# Altium footprint library Chris_R.PcbLib: 69 footprints (part 2 of 5)
Each footprint in its own frame and in the unit in brackets; x right, y up, seen from the top. Pads: shape width x height; smd on the part's side, far side on the other; paste and mask are expansions set on the pad; w line width, h text height; cw(c..) or ccw(c..) is an arc to the next point about the centre after c.
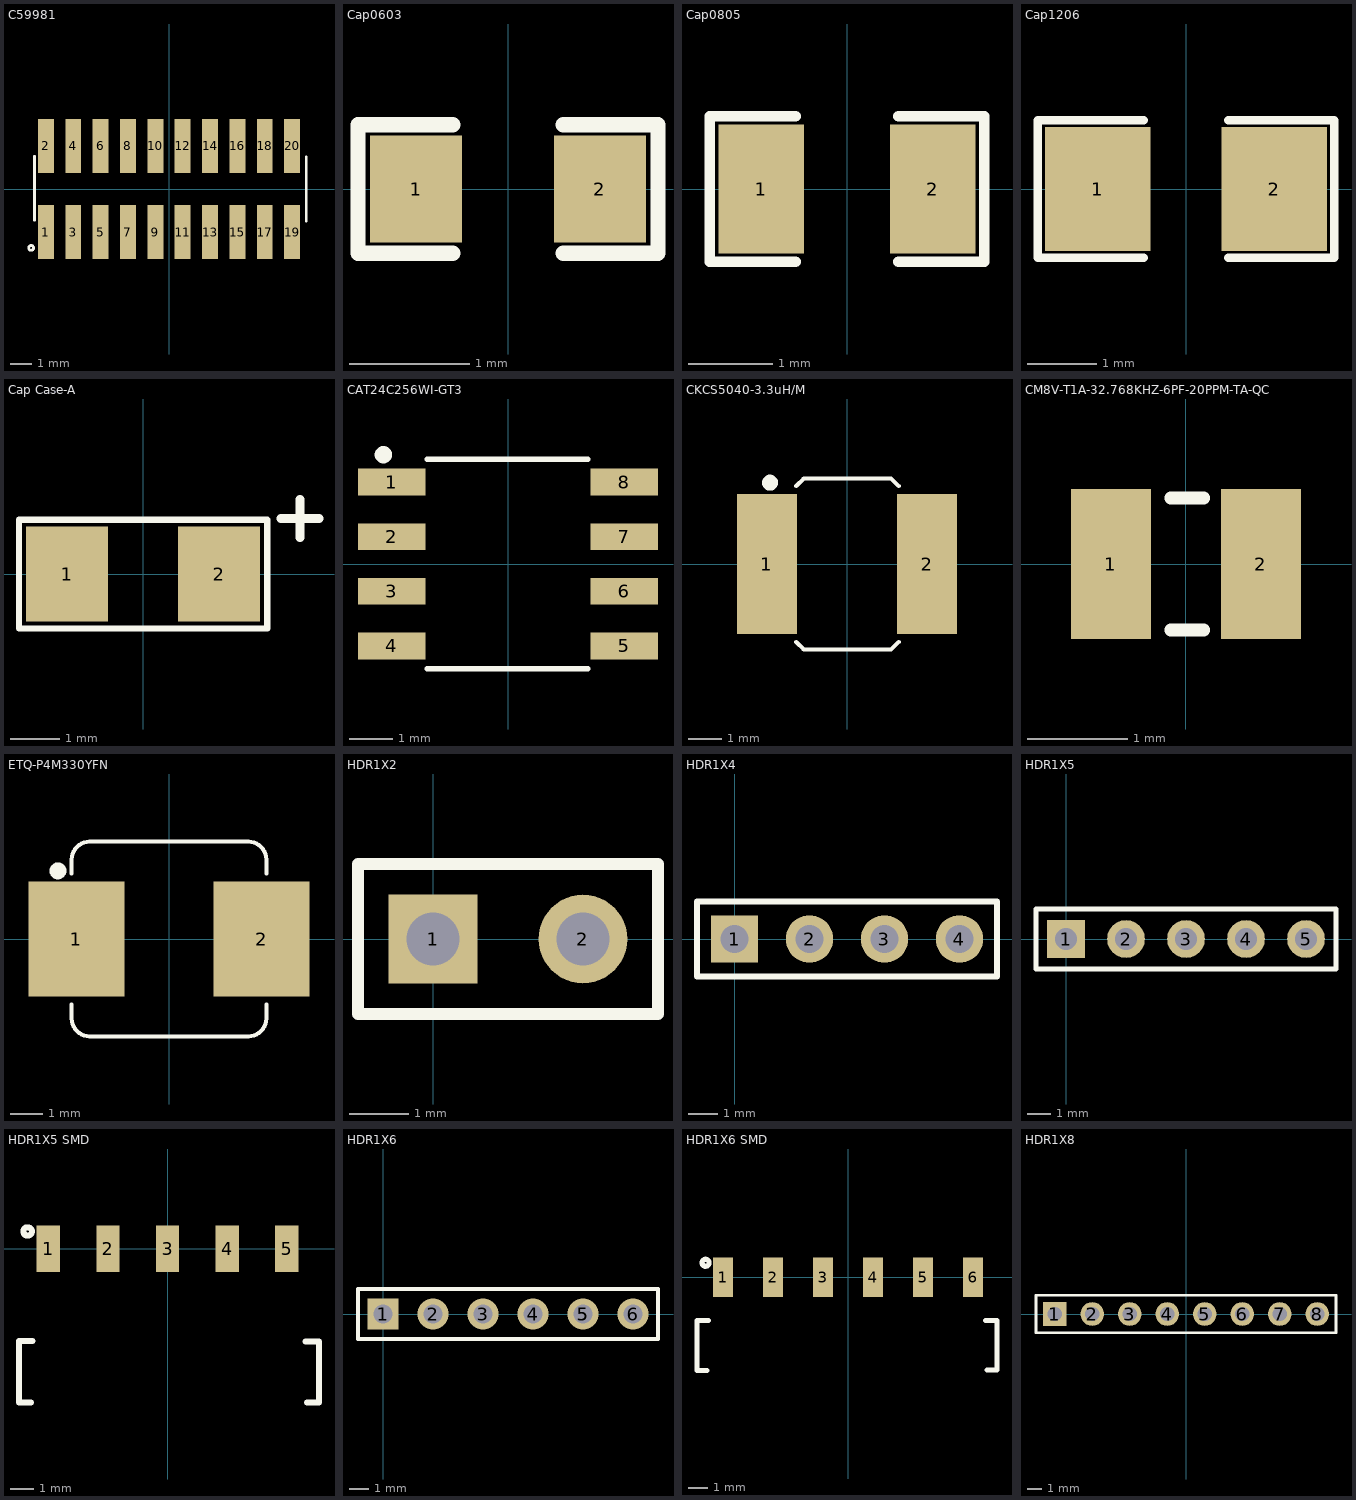
[diagram p1: the footprints below, top view; thin cyan lines are the x and y axes]

## C59981 [mm]
pads (20):
  rect 0.74x2.5 smd: 1(-5.715,-2) 2(-5.715,2) 3(-4.445,-2) 4(-4.445,2) 5(-3.175,-2) 6(-3.175,2) 7(-1.905,-2) 8(-1.905,2) 9(-0.635,-2) 10(-0.635,2) 11(0.635,-2) 12(0.635,2) 13(1.905,-2) 14(1.905,2) 15(3.175,-2) 16(3.175,2) 17(4.445,-2) 18(4.445,2) 19(5.715,-2) 20(5.715,2)
Top Overlay:
  circle w0.127: c-6.401,-2.737 r0.114
  lines w0.127: -6.248,-1.452 -6.248,1.516 ; 6.375,-1.484 6.375,1.484
3D body "M50-3601042.STEP": height 4.65, standoff -0.03, extent -6.388,-2.756 6.312,2.744

## Cap0603 [mil]
pads (2):
  rect 30x35 smd mask+2.36: 1(-30,0) 2(30,0)
Top Overlay:
  lines w5: -18,-21 -49,-21 -49,21 -18,21 ; 18,-21 49,-21 49,21 18,21
3D body "User Library-CAPC1608X09.step": height 34.25, standoff -1.18, extent -31.51,-15.75 31.49,15.74

## Cap0805 [mil] "SMD 0805"
pads (2):
  rect 40x60 smd mask+2.76: 1(-40,0) 2(40,0)
Top Overlay:
  lines w5: -24,-34 -64,-34 -64,34 -24,34 ; 24,-34 64,-34 64,34 24,34
3D body "User Library-0805 SMD Capacitor.step": height 30, standoff -0.79, extent -39.36,-24.6 39.38,24.61

## Cap1206 [mil] "SMD 1206"
pads (2):
  rect 60x70 smd: 1(-50,0) 2(50,0)
Top Overlay:
  lines w5: -24,-39 -84,-39 -84,39 -24,39 ; 24,-39 84,-39 84,39 24,39
3D body "User Library-1206 SMD Capacitor.step": height 39.45, standoff 0, extent -62.96,-31.46 63.03,31.53

## Cap Case-A [mil] "Case-A"
pads (2):
  rect 65x75 smd: 1(-60,0) 2(60,0)
Top Overlay:
  lines w5: -98,-43 -98,43 98,43 98,-43 -98,-43
  lines w7: 109,44 139,44 ; 124,29 124,59
3D body "User Library-CAP_TANT_3216-18_A_case.step": height 70.87, standoff 0, extent -66.93,-35.44 66.92,35.42

## CAT24C256WI-GT3 [mm]
pads (8):
  rect 1.57x0.62 smd: 1(-2.7,1.905) 2(-2.7,0.635) 3(-2.7,-0.635) 4(-2.7,-1.905) 5(2.7,-1.905) 6(2.7,-0.635) 7(2.7,0.635) 8(2.7,1.905)
Top Overlay:
  circle w0.2: c-2.896,2.54 r0.102
  lines w0.127: -1.88,-2.438 1.854,-2.438 ; -1.88,2.438 1.854,2.438
3D body "User Library-SOIC-8-1.step": height 1.75, standoff 0, extent -3,-2.45 3,2.45

## CKCS5040-3.3uH/M [mm] "SMD Power Inductors ROHS"
pads (2):
  rect 1.8x4.2 smd: 1(-2.4,0) 2(2.4,0)
Top Overlay:
  circle w0.254: c-2.311,2.438 r0.114
  lines w0.127: -1.524,-2.337 -1.295,-2.565 1.321,-2.565 1.549,-2.337 ; -1.524,2.337 -1.295,2.565 1.321,2.565 1.549,2.337
3D body "L_5x5mm_h2mm.step": height 2, standoff 0, extent -2.5,-2.489 2.5,2.511

## CM8V-T1A-32.768KHZ-6PF-20PPM-TA-QC [mm]
pads (2):
  rect 0.8x1.5 smd: 1(-0.75,0) 2(0.75,0)
Top Overlay:
  lines w0.127: -0.152,-0.66 0.178,-0.66 ; -0.152,0.66 0.178,0.66
3D body "CM8V-T1A-32.768KHZ-6PF-20PPM-TA-QC.STEP": height 0.35, standoff 0, extent -1,-0.6 1,0.6

## ETQ-P4M330YFN [mm] "FIXED IND 33UH 2.5A 189.2MOHM SM"
pads (2):
  rect 3x3.6 smd: 1(-2.9,0) 2(2.9,0)
Top Overlay:
  circle w0.254: c-3.48,2.134 r0.137
  lines w0.127: -3.048,-2.057 -3.048,-2.489 ccw(c-2.489,-2.489) -2.489,-3.048 2.464,-3.048 ; -3.048,2.057 -3.048,2.489 cw(c-2.489,2.489) -2.489,3.048 2.464,3.048 ; 2.489,-3.048 ccw(c2.489,-2.489) 3.048,-2.489 3.048,-2.057 ; 2.489,3.048 cw(c2.489,2.489) 3.048,2.489 3.048,2.057
3D body "ETQP4M330YFN.STEP": height 4.39, standoff -0.04, extent -3.2,-3 3.3,3

## HDR1X2 [mm] "CONN HEADER VERT 2POS 2.54MM"
pads (2):
  rect 1.5x1.5 hole 0.9: 1(0,0)
  round 1.5 hole 0.9: 2(2.54,0)
Top Overlay:
  lines w0.2: -1.27,-1.27 -1.27,1.27 3.81,1.27 3.81,-1.27 -1.27,-1.27
3D body "User Library-Header1x2.STEP": height 8.44, standoff -2.54, extent -1.27,-1.27 3.81,1.27

## HDR1X4 [mm] "Connector; Header; 4 Position"
pads (4):
  rect 1.6x1.6 hole 0.95: 1(0,0)
  round 1.6 hole 0.95: 2(2.54,0) 3(5.08,0) 4(7.62,0)
Top Overlay:
  lines w0.2: -1.27,-1.27 -1.27,1.27 8.89,1.27 8.89,-1.27 -1.27,-1.27
3D body "User Library-1x4 TH Pitch 2_54mm.STEP": height 9.5, standoff -3.2, extent -1.27,-1.27 8.89,1.27

## HDR1X5 [mm] "Connector; Header; 5 Position"
pads (5):
  rect 1.6x1.6 hole 0.95: 1(0,0)
  round 1.6 hole 0.95: 2(2.54,0) 3(5.08,0) 4(7.62,0) 5(10.16,0)
Top Overlay:
  lines w0.2: -1.27,-1.27 11.43,-1.27 11.43,1.27 -1.27,1.27 -1.27,-1.27
3D body "61300511021_Download_STP_61300511021_rev1.stp": height 2.47, standoff -3.07, extent -1.27,-10.013 11.43,0.347

## HDR1X5 SMD [mm]
pads (5):
  rect 1x2 smd: 1(-5.08,0) 2(-2.54,0) 3(0,0) 4(2.54,0) 5(5.08,0)
Top Overlay:
  circle w0.254: c-5.969,0.737 r0.18
  lines w0.254: -5.829,-6.572 -6.337,-6.572 -6.337,-3.941 -5.753,-3.941 ; 5.88,-3.967 6.464,-3.967 6.464,-6.566 5.956,-6.566
3D body "TSM-105-01-L-SH.stp": height 3.05, standoff 0, extent -6.35,-12.421 6.35,0.533

## HDR1X6 [mm] "Connector; Header; 6 Position"
pads (7):
  rect 1.6x1.6 hole 0.95: 1(0,0)
  round 1.6 hole 0.95: 2(2.54,0) 3(5.08,0) 4(7.62,0) 5(10.16,0) 5(10.16,0) 6(12.7,0)
Top Overlay:
  lines w0.2: -1.27,-1.27 -1.27,1.27 13.97,1.27 13.97,-1.27 -1.27,-1.27
3D body "61300611021_Downloads_STP_61300611021_rev1.stp": height 2.47, standoff -3.07, extent -1.27,-9.975 13.97,0.385

## HDR1X6 SMD [mm]
pads (6):
  rect 1x2 smd: 1(-6.35,0) 2(-3.81,0) 3(-1.27,0) 4(1.27,0) 5(3.81,0) 6(6.35,0)
Top Overlay:
  circle w0.254: c-7.239,0.737 r0.18
  lines w0.254: -7.163,-4.731 -7.671,-4.731 -7.671,-2.199 -7.087,-2.199 ; 6.985,-2.183 7.569,-2.183 7.569,-4.714 7.061,-4.714
3D body "m20-8890645_asm.stp": height 2.5, standoff 0, extent -7.62,-10.734 7.62,0.762

## HDR1X8 [mm] "Connector; Header; 8 Position"
pads (8):
  rect 1.6x1.6 hole 0.95: 1(-8.89,0)
  round 1.6 hole 0.95: 2(-6.35,0) 3(-3.81,0) 4(-1.27,0) 5(1.27,0) 6(3.81,0) 7(6.35,0) 8(8.89,0)
Top Overlay:
  lines w0.2: -10.16,-1.27 -10.16,1.27 10.16,1.27 10.16,-1.27 -10.16,-1.27
3D body "User Library-1x8 TH Pitch 2_54mm.STEP": height 9.4, standoff -3.3, extent -10.134,-1.244 10.186,1.296